# Altium footprint library PI3L720ZHEX.PcbLib: 1 footprints
Each footprint in its own frame and in the unit in brackets; x right, y up, seen from the top. Pads: shape width x height; smd on the part's side, far side on the other; paste and mask are expansions set on the pad; w line width, h text height; cw(c..) or ccw(c..) is an arc to the next point about the centre after c.
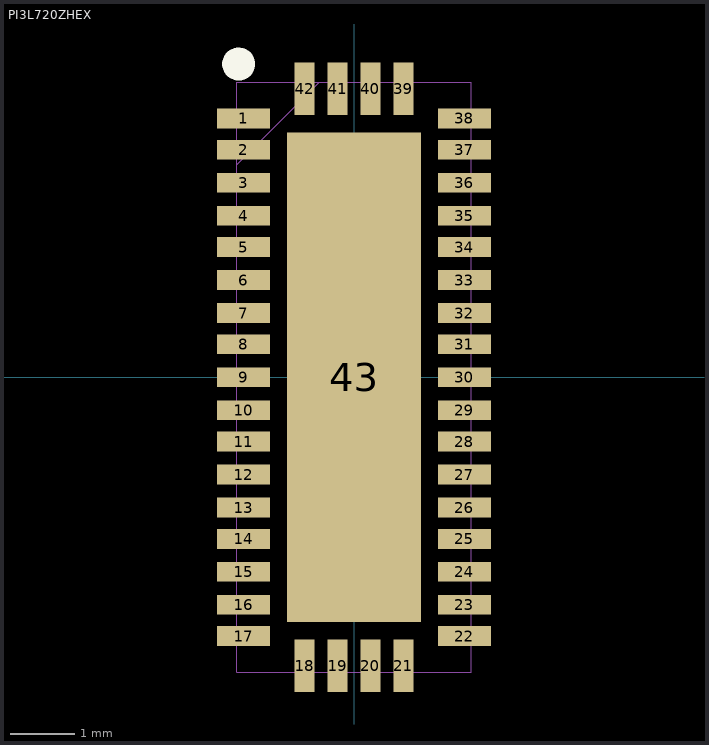
[diagram p0: the footprint, top view; thin cyan lines are the x and y axes]

## PI3L720ZHEX [mil] "QFN50P350X900X80-43N"
pads (43):
  rect 32x12 smd: 1(-67,157) 2(-67,138) 3(-67,118) 4(-67,98) 5(-67,79) 6(-67,59) 7(-67,39) 8(-67,20) 9(-67,0) 10(-67,-20) 11(-67,-39) 12(-67,-59) 13(-67,-79) 14(-67,-98) 15(-67,-118) 16(-67,-138) 17(-67,-157) 22(67,-157) 23(67,-138) 24(67,-118) 25(67,-98) 26(67,-79) 27(67,-59) 28(67,-39) 29(67,-20) 30(67,0) 31(67,20) 32(67,39) 33(67,59) 34(67,79) 35(67,98) 36(67,118) 37(67,138) 38(67,157)
  rect 12x32 smd: 18(-30,-175) 19(-10,-175) 20(10,-175) 21(30,-175) 39(30,175) 40(10,175) 41(-10,175) 42(-30,175)
  rect 81x297 smd: 43(0,0)
Top Overlay:
  circle w10: c-70,190 r5
Mechanical 13:
  lines w0: -71,-179 -71,179 ; -71,-179 71,-179 ; -71,-179 -71,179 ; -71,-179 71,-179 ; -71,179 71,179 ; -71,179 71,179 ; 71,-179 71,179 ; 71,-179 71,179 ; -71,-163 -71,-152 -71,-163 ; -71,-144 -71,-132 -71,-144 ; -71,-124 -71,-112 -71,-124 ; -71,-104 -71,-93 -71,-104 ; -71,-85 -71,-73 -71,-85 ; -71,-65 -71,-53 -71,-65 ; -71,-45 -71,-33 -71,-45 ; -71,-26 -71,-14 -71,-26 ; -71,-6 -71,6 -71,-6 ; -71,14 -71,26 -71,14 ; -71,33 -71,45 -71,33 ; -71,53 -71,65 -71,53 ; -71,73 -71,85 -71,73 ; -71,93 -71,104 -71,93 ; -71,112 -71,124 -71,112 ; -71,129 -21,179 -71,129 ; -71,132 -71,144 -71,132 ; -71,152 -71,163 -71,152 ; -35,-179 -24,-179 -35,-179 ; -35,179 -24,179 -35,179 ; -16,-179 -4,-179 -16,-179 ; -16,179 -4,179 -16,179 ; 4,-179 16,-179 4,-179 ; 4,179 16,179 4,179 ; 24,-179 35,-179 24,-179 ; 24,179 35,179 24,179 ; 71,-163 71,-152 71,-163 ; 71,-144 71,-132 71,-144 ; 71,-124 71,-112 71,-124 ; 71,-104 71,-93 71,-104 ; 71,-85 71,-73 71,-85 ; 71,-65 71,-53 71,-65 ; 71,-45 71,-33 71,-45 ; 71,-26 71,-14 71,-26 ; 71,-6 71,6 71,-6 ; 71,14 71,26 71,14 ; 71,33 71,45 71,33 ; 71,53 71,65 71,53 ; 71,73 71,85 71,73 ; 71,93 71,104 71,93 ; 71,112 71,124 71,112 ; 71,132 71,144 71,132 ; 71,152 71,163 71,152
3D body: height 20, standoff 0, extent -70,-175 70,175